# Altium schematic symbol library Switch.SchLib: 116 symbols (part 2 of 2)
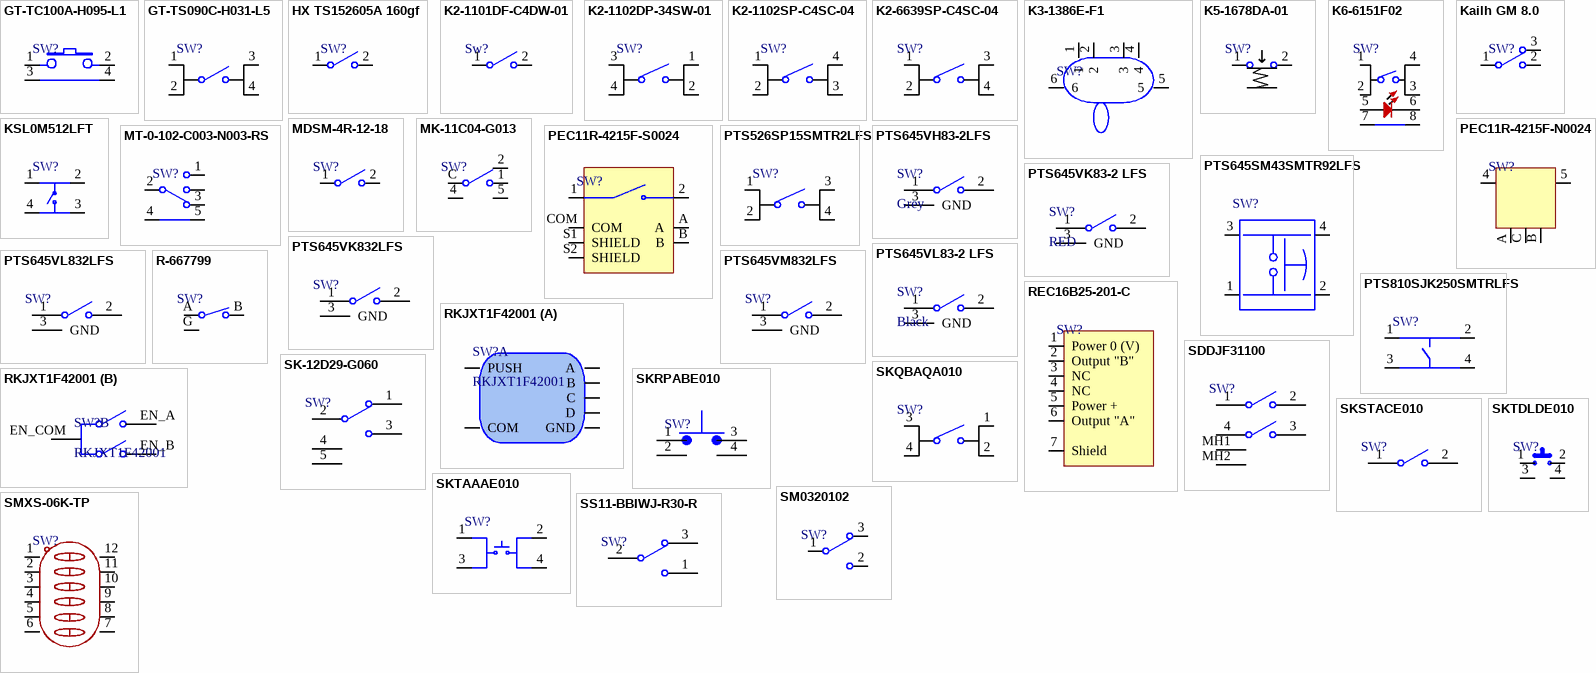
[diagram p3: symbols GT-TC100A-H095-L1 to SS11-BBIWJ-R30-R]

## MT-0-102-C003-N003-RS
designator SW?
125V Single Pole Double Throw (SPDT) Direct Insert 5A Plugin Toggle Switches ROHS; Manufacturer: YUEN FUNG; Manufacturer Part Number: MT-0-102-C003-N003-RS; Package: Plugin; LCSC Part Number: C1788495; Item Type: Toggle Switch; ComponentLink1Description: LCSC; ComponentLink1URL: https://www.lcsc.com/product-detail/Toggle-Switches_YUEN-FUNG-MT-0-102-C003-N003-RS_C1788495.html
footprint MT-0-102-C003-N003-RS*
pins: 1, 2, 3, 4, 5

## PEC11R-4215F-N0024
designator SW?
ROTARY ENCODER MECHANICAL 24PPR; Manufacturer: Bourns; Manufacturer Part Number: PEC11R-4215F-N0024; Item Type: Encoders; Supplier: Digikey; Supplier Part Number: PEC11R-4215F-N0024-ND; RoHS: Yes; Stock: 7495; Pricing: 1=1.92, 5=1.644, 10=1.54, 25=1.4116, 75=1.27227, 150=1.19127, 300=1.11517, 525=1.0571, 1050=0.9891 (USD); Housing Material: 4240ConductorMaterial; Length: 21.5mm; Width: 12.5mm; Height: 13.4mm; ComponentLink1URL: https://datasheet.ciiva.com/29349/pec11r-29349512.pdf?src-supplier=Digikey; ComponentLink1Description: https://datasheet.ciiva.com/29349/pec11r-29349512.pdf?src-supplier=Digikey; ComponentLink2URL: https://datasheet.ciiva.com/29927/pec11r-29927637.pdf?src-supplier=Avnet; ComponentLink2Description: https://datasheet.ciiva.com/29927/pec11r-29927637.pdf?src-supplier=Avnet
footprint PEC11R-4215F-N0024
pins: 4, 5, A, B, C

## PEC11R-4215F-S0024
designator SW?
ENCODER MECH QUAD VERT PC PIN; Manufacturer: Bourns; Manufacturer Part Number: PEC11R-4215F-S0024; Item Type: Encoders; Built in Switch: Yes; Current Rating: 10mA; Encoder Type: Incremental; Hole Diameter: 1.8mm; Number of Channels: 2; Number of Positions: 18; Output Type: Incremental, Quadrature; Pulses per Revolution: 24; Voltage Rating (DC): 5V; Supplier: Avnet; LCSC Part Number: C143790; RoHS: Compliant; Stock: 117; Pricing: 1=2.3, 10=2.07, 25=1.99, 50=1.91, 100=1.83 (USD); Detent: Yes; Height: 21.5mm; Housing Material: Metal; Length: 21.5mm; Lifecycle Status: Production; Max Operating Temperature: 70°C; Min Operating Temperature: -30°C; Mounting Technology: PCB, Panel, Through Hole; Orientation: Vertical; Packaging: Bulk; Radiation Hardening: No; REACH SVHC: Yes; Schedule B: 8543709655, 8543709655|8543709655, 8543709655|8543709655|8543709655, 8543709655|8543709655|8543709655|8543709655; Termination: PC Pins; Type: Mechanical; Width: 12.5mm; ComponentLink1URL: https://datasheet.octopart.com:443/PEC11R-4215F-S0024-Bourns-datasheet-152588733.pdf?src-supplier=IHS; ComponentLink1Description: https://datasheet.octopart.com:443/PEC11R-4215F-S0024-Bourns-datasheet-152588733.pdf?src-supplier=IHS; ComponentLink2URL: https://datasheet.octopart.com:443/PEC11R-4215F-S0024-Bourns-datasheet-68303416.pdf?src-supplier=Burklin+Elektronik; ComponentLink2Description: https://datasheet.octopart.com:443/PEC11R-4215F-S0024-Bourns-datasheet-68303416.pdf?src-supplier=Burklin+Elektronik; ComponentLink3URL: https://datasheet.octopart.com:443/PEC11R-4215F-S0024-Bourns-datasheet-41168452.pdf?src-supplier=element14+APAC; ComponentLink3Description: https://datasheet.octopart.com:443/PEC11R-4215F-S0024-Bourns-datasheet-41168452.pdf?src-supplier=element14+APAC; ComponentLink4URL: https://datasheet.octopart.com:443/PEC11R-4215F-S0024-Bourns-datasheet-16095859.pdf?src-supplier=RS+(Formerly+Allied+Electronics); ComponentLink4Description: https://datasheet.octopart.com:443/PEC11R-4215F-S0024-Bourns-datasheet-16095859.pdf?src-supplier=RS+(Formerly+Allied+Electronics); ComponentLink5URL: https://datasheet.octopart.com/PEC11R-4215F-S0024-Bourns-datasheet-16722594.pdf; ComponentLink5Description: https://datasheet.octopart.com/PEC11R-4215F-S0024-Bourns-datasheet-16722594.pdf; ComponentLink6URL: http://sigma.octopart.com:80/conflict_mineral_statement/Bourns-company-36.pdf?src-supplier=Compliance+Statements; ComponentLink6Description: http://sigma.octopart.com:80/conflict_mineral_statement/Bourns-company-36.pdf?src-supplier=Compliance+Statements
footprint PEC11R-4215F-S0024
pins: 1, 2, A, B, COM, S1 SHIELD, S2 SHIELD

## PTS526SP15SMTR2LFS
designator SW?
Tactile Switches 5.20 x 5.20 Tact Switch for SMT; Manufacturer: ITT C&K; Manufacturer Part Number: PTS526SP15SMTR2LFS; Supplier: Mouser; LCSC Part Number: C2991193; RoHS: No; Item Type: Switch; Stock: 8224; Pricing: 1=0.14, 10=0.135, 50=0.135, 100=0.12, 1000=0.12, 10000=0.102 (USD)
footprint PTS526SP15SMTR2 LFS
pins: 1, 2, 3, 4

## PTS645SM43SMTR92LFS
designator SW?
SWITCH TACTILE SPST-NO 0.05A 12V; Manufacturer: ITT C&K; Manufacturer Part Number: PTS645SM43SMTR92LFS; ComponentLink5URL: https://www.lcsc.com/product-detail/Tactile-Switches_C-K-PTS645SM43SMTR92LFS_C221880.html; ComponentLink5Description: LCSC; Package: SMD-4P,6x6mm; LCSC Part Number: C221880; Item Type: Switch
footprint PTS645SM43SMTR92LFS_ (SWITCH TACTILE SPST-NO 0.05A 12V)
pins: 1, 2, 3, 4

## PTS645VH83-2LFS
designator SW?, comment Grey
SWITCH TACTILE SPST-NO 0.05A 12V; Manufacturer: ITT C&K; Manufacturer Part Number: PTS645VH83-2LFS; Mechanical Life: 100000Cycles; Actuator Material: Nylon,Polyamide,PA66; Operating Force: 1.96N; Throw Configuration: SPST; Max Current Rating: 50mA; Illumination Type: Non-Illuminated; Switch Function: Off-Mom; Actuator Type: Standard; Supplier 1: RSComponents; RoHS: Yes; Category: Tactile Switches; Stock 1: 1; Pricing 1: 1=168.53700 (USD); Mount: Through Hole; Contact Plating: Silver; Contact Material: Bronze; Color: Black; Min Operating Temperature: -20°C; Max Operating Temperature: 60°C; Packaging: Bulk; Max Voltage Rating (DC): 12V; Termination: PC Pins; Voltage Rating (DC): 12V; Current Rating: 50mA; Package Quantity: 1000; Orientation: Right Angle; Series: PTS645; Length: 8.5mm; Depth: 12.3mm; Radiation Hardening: No; Lead Free: Lead Free; RoHS Compliant: Yes; ComponentLink1URL: https://datasheet.ciiva.com/26930/getdatasheetpartid-759839-26930136.pdf?src-supplier=Verical; ComponentLink1Description: https://datasheet.ciiva.com/26930/getdatasheetpartid-759839-26930136.pdf?src-supplier=Verical; ComponentLink2URL: https://datasheet.ciiva.com/14920/pts645-14920698.pdf?src-supplier=Digi-Key; ComponentLink2Description: https://datasheet.ciiva.com/14920/pts645-14920698.pdf?src-supplier=Digi-Key; Supplier Part Number 1: 1359158; LCSC Part Number: C221889
footprint PTS645VH83-2LFS_
pins: 1, 2, 3 GND

## PTS645VK83-2 LFS
designator SW?, comment RED
SWITCH TACTILE SPST-NO 0.05A 12V; Manufacturer: ITT C&K; Manufacturer Part Number: PTS645VK83-2LFS; Mechanical Life: 100000Cycles; Actuator Material: Nylon,Polyamide,PA66; Operating Force: 260gf; Current Rating: 50mA; Illumination Type: Non-Illuminated; Throw Configuration: SPST; Switch Function: Off-Mom; Actuator Type: Standard; Supplier 1: Mouser; RoHS: Yes; Category: Tactile Switches; Stock 1: 15223; Pricing 1: 1=0.29000, 10=0.27900, 50=0.27400, 100=0.25800, 1000=0.17200, 10000=0.16500 (USD); Mount: Through Hole; Color: Black; Contact Plating: Silver; Min Operating Temperature: -20°C; Max Operating Temperature: 60°C; Package Quantity: 1000; Packaging: Bulk; Voltage Rating (DC): 12V; Termination: PC Pin; Max Current Rating: 50mA; Orientation: Right Angle; Series: PTS645; Length: 8.5mm; Depth: 12.3mm; Lead Free: Lead Free; RoHS Compliant: Yes; ComponentLink1URL: http://components.arrow.com/part/dataview/58497163S587771N9444?src-supplier=Arrow+Electronics; ComponentLink1Description: http://components.arrow.com/part/dataview/58497163S587771N9444?src-supplier=Arrow+Electronics; Supplier Part Number 1: 611-PTS645VK832; LCSC Part Number: C2798927
footprint PTS645VK83-2 LFS_
pins: 1, 2, 3 GND

## PTS645VK832LFS
designator SW?
Switch Tactile N.O. SPST Round Button PC Pins 0.05A 12VDC 100000Cycles 2.55N Bracket Mount/Through Hole Bulk; Manufacturer: ITT C&K; Manufacturer Part Number: PTS645VK83-2LFS; Actuator Material: Nylon,Polyamide,PA66; Operating Force: 260gf; Current Rating: 50mA; Voltage Rating (DC): 12V; Illumination Type: Non-Illuminated; Switch Function: Off-Mom; Actuator Type: Standard; Supplier 1: Mouser; RoHS: Yes; Category: Tactile Switches; Stock 1: 15223; Pricing 1: 1=0.29000, 10=0.27900, 50=0.27400, 100=0.25800, 1000=0.17200, 10000=0.16500 (USD); Mount: Through Hole; Color: Black; Contact Plating: Silver; Mechanical Life: 100000Cycles; Min Operating Temperature: -20°C; Max Operating Temperature: 60°C; Package Quantity: 1000; Packaging: Bulk; Termination: PC Pin; Throw Configuration: SPST; Max Current Rating: 50mA; Orientation: Right Angle; Series: PTS645; Length: 8.5mm; Depth: 12.3mm; Lead Free: Lead Free; RoHS Compliant: Yes; ComponentLink1URL: http://components.arrow.com/part/dataview/58497163S587771N9444?src-supplier=Arrow+Electronics; ComponentLink1Description: http://components.arrow.com/part/dataview/58497163S587771N9444?src-supplier=Arrow+Electronics; Supplier Part Number 1: 611-PTS645VK832
footprint PTS645VK832LFS_
pins: 1, 2, 3 GND

## PTS645VL83-2 LFS
designator SW?, comment Black
SWITCH TACTILE SPST-NO 0.05A 12V; Manufacturer: ITT C&K; Manufacturer Part Number: PTS645VL83-2LFS; Mechanical Life: 100000Cycles; Actuator Material: Nylon,Polyamide,PA66; Throw Configuration: SPST; Operating Force: 1.27N; Max Current Rating: 50mA; Illumination Type: Non-Illuminated; Switch Function: Off-Mom; Actuator Type: Standard; Supplier 1: Future Electronics; RoHS: Yes; Category: Tactile Switches; Stock 1: 29000; Pricing 1: 1000=0.17400, 2000=0.17000, 4000=0.16700, 5000=0.16600, 15000=0.15900 (USD); Mount: Through Hole; Contact Plating: Silver; Contact Material: Bronze; Color: Black; Min Operating Temperature: -20°C; Max Operating Temperature: 60°C; Packaging: Bulk; Max Voltage Rating (DC): 12V; Termination: PC Pins; Current Rating: 50mA; Voltage Rating (DC): 12V; Package Quantity: 1000; Orientation: Right Angle; Series: PTS645; Length: 7.5mm; Depth: 12.3mm; Radiation Hardening: No; Lead Free: Lead Free; RoHS Compliant: Yes; ComponentLink1URL: https://datasheet.ciiva.com/14920/pts645-14920695.pdf?src-supplier=Digi-Key; ComponentLink1Description: https://datasheet.ciiva.com/14920/pts645-14920695.pdf?src-supplier=Digi-Key; ComponentLink2URL: https://datasheet.ciiva.com/48483/pts645-48483566.pdf?src-supplier=Avnet; ComponentLink2Description: https://datasheet.ciiva.com/48483/pts645-48483566.pdf?src-supplier=Avnet; Supplier Part Number 1: 5057816; LCSC Part Number: C2798965
footprint PTS645VL83-2/LFS_
pins: 1, 2, 3 GND

## PTS645VL832LFS
designator SW?
SWITCH TACTILE SPST-NO 0.05A 12V; Manufacturer: ITT C&K; Manufacturer Part Number: PTS645VL83-2LFS; Mechanical Life: 100000Cycles; Actuator Material: Nylon,Polyamide,PA66; Throw Configuration: SPST; Operating Force: 1.27N; Max Current Rating: 50mA; Illumination Type: Non-Illuminated; Switch Function: Off-Mom; Actuator Type: Standard; Supplier 1: Future Electronics; RoHS: Yes; Category: Tactile Switches; Stock 1: 29000; Pricing 1: 1000=0.17400, 2000=0.17000, 4000=0.16700, 5000=0.16600, 15000=0.15900 (USD); Mount: Through Hole; Contact Plating: Silver; Contact Material: Bronze; Color: Black; Min Operating Temperature: -20°C; Max Operating Temperature: 60°C; Packaging: Bulk; Max Voltage Rating (DC): 12V; Termination: PC Pins; Current Rating: 50mA; Voltage Rating (DC): 12V; Package Quantity: 1000; Orientation: Right Angle; Series: PTS645; Length: 7.5mm; Depth: 12.3mm; Radiation Hardening: No; Lead Free: Lead Free; RoHS Compliant: Yes; ComponentLink1URL: https://datasheet.ciiva.com/14920/pts645-14920695.pdf?src-supplier=Digi-Key; ComponentLink1Description: https://datasheet.ciiva.com/14920/pts645-14920695.pdf?src-supplier=Digi-Key; ComponentLink2URL: https://datasheet.ciiva.com/48483/pts645-48483566.pdf?src-supplier=Avnet; ComponentLink2Description: https://datasheet.ciiva.com/48483/pts645-48483566.pdf?src-supplier=Avnet; Supplier Part Number 1: 5057816; LCSC Part Number: C285525
footprint PTS645VL832LFS_
pins: 1, 2, 3 GND

## PTS645VM832LFS
designator SW?
Blue SWITCH TACTILE SPST-NO 0.05A 12V; Manufacturer: ITT C&K; Manufacturer Part Number: PTS645VM83-2LFS; Mechanical Life: 100000Cycles; Actuator Material: Nylon,Polyamide,PA66; Operating Force: 1.57N; Current Rating: 50mA; Throw Configuration: SPST; Illumination Type: Non-Illuminated; Switch Function: Off-Mom; Actuator Type: Standard; Supplier 1: Mouser; RoHS: Yes; Category: Tactile Switches; Stock 1: 10398; Pricing 1: 1=0.32000, 10=0.30600, 50=0.28900, 100=0.25700, 1000=0.18100, 10000=0.17400 (USD); Mount: Through Hole; Color: Black; Contact Plating: Silver; Min Operating Temperature: -20°C; Max Operating Temperature: 60°C; Package Quantity: 1000; Packaging: Bulk; Voltage Rating (DC): 12V; Max Current Rating: 50mA; Termination: PC Pins; Orientation: Right Angle; Series: PTS645; Length: 7.5mm; Depth: 12.3mm; RoHS Compliant: Yes; ComponentLink1URL: https://datasheet.ciiva.com/26859/getdatasheetpartid-742303-26859307.pdf?src-supplier=Verical; ComponentLink1Description: https://datasheet.ciiva.com/26859/getdatasheetpartid-742303-26859307.pdf?src-supplier=Verical; Supplier Part Number 1: 611-PTS645VM832; LCSC Part Number: C285530
footprint PTS645VM832LFS_
pins: 1, 2, 3 GND

## PTS810SJK250SMTRLFS
designator SW?
SWITCH TACTILE SPST-NO 0.05A 16V; Manufacturer: ITT C&K; Manufacturer Part Number: PTS810SJK250SMTRLFS; Item Type: Tactile Switches; Number of Positions: 2NUMBER; Supplier: Rs; LCSC Part Number: C221896; RoHS: Yes; Stock: 100; Lead Free: 5697LeadFree; ComponentLink1URL: https://datasheet.ciiva.com/18514/pts810-4mar13-18514061.pdf?src-supplier=Digikey; ComponentLink1Description: https://datasheet.ciiva.com/18514/pts810-4mar13-18514061.pdf?src-supplier=Digikey; ComponentLink2URL: https://datasheet.ciiva.com/18514/pts810-4mar13-18514062.pdf?src-supplier=Digikey; ComponentLink2Description: https://datasheet.ciiva.com/18514/pts810-4mar13-18514062.pdf?src-supplier=Digikey; ComponentLink3URL: https://datasheet.ciiva.com/18514/pts810-4mar13-18514063.pdf?src-supplier=Digikey; ComponentLink3Description: https://datasheet.ciiva.com/18514/pts810-4mar13-18514063.pdf?src-supplier=Digikey
footprint PTS810SJK250SMTR LFS
pins: 1, 2, 3, 4

## R-667799
designator SW?
SWITCH TACTILE, SPST-NO, 0.05A 1; Manufacturer: Mitsumi; Manufacturer Part Number: R-667799; Item Type: Tactile Switch; Supplier: Digi-Key; Supplier Part Number: 2508-R-667799CT-ND; RoHS: No; Category: Tactile Switches; Stock: 11526; Pricing: 1=0.32, 10=0.31, 25=0.2944, 100=0.2666, 250=0.24304, 500=0.2259, 1000=0.19271, 2500=0.18736 (USD)
footprint R-667799
pins: A, B, G

## REC16B25-201-C
designator SW?
ROTARY ENCODER OPTICAL 25PPR; Manufacturer: Nidec Copal; Manufacturer Part Number: REC16B25-201-C; Operating Supply Voltage: 5V; Pulses per Revolution: 25; Output Type: Quadrature,Incremental; Detent: No; Hole Diameter: 9mm; Supplier: Digikey; LCSC Part Number: C2921942; RoHS: Yes; Category: Encoders; Pricing: 20=19.018 (USD); Mounting Technology: Through Hole,Panel,PCB; Series: REC16; Encoder Type: Optical; Built in Switch: No; Orientation: Vertical; Termination: PC Pin; RoHS Compliant: Yes; ComponentLink1URL: https://datasheet.ciiva.com/11832/0900766b80933a69-11832618.pdf?src-supplier=Rs; ComponentLink1Description: https://datasheet.ciiva.com/11832/0900766b80933a69-11832618.pdf?src-supplier=Rs; ComponentLink2URL: https://datasheet.ciiva.com/18424/70041175-18424549.pdf?src-supplier=Allied+Electronics; ComponentLink2Description: https://datasheet.ciiva.com/18424/70041175-18424549.pdf?src-supplier=Allied+Electronics; Item Type: Rotary Encoder
footprint REC16B25-201-C
pins: 1 Power 0 (V), 2 Output "B", 3 NC, 4 NC, 5 Power +, 6 Output "A", 7 Shield

## RKJXT1F42001
designator SW?
Electromechanical Switch 4-Directional Stick Switch 0.01A Bulk; Manufacturer: Alps Alpine; Manufacturer Part Number: RKJXT1F42001; Item Type: Switch; Supplier: Mouser; Supplier Part Number: 688-RKJXT1F42001; RoHS: Yes; Category: Pushbutton Switches; Stock: 1987; Pricing: 1=8.44, 10=7.1, 25=6.33, 50=6.33, 100=5.99, 250=5.75, 1000=5.75, 10000=5.75 (USD); ComponentLink1URL: https://datasheet.ciiva.com/16197/rkjxt-16197381.pdf?src-supplier=Onlinecomponents.com; ComponentLink1Description: https://datasheet.ciiva.com/16197/rkjxt-16197381.pdf?src-supplier=Onlinecomponents.com
footprint RKJXT1F42001
part A pins: A, B, C, COM, D, GND, PUSH
part B pins: EN_A, EN_B, EN_COM

## SDDJF31100
designator SW?
Black Concave edge bending Double pole single throw O - Solder Lug(Straight foot) 16A 250V Plugin Rocker Switches ROHS; Manufacturer: ALPSALPINE; Manufacturer Part Number: SDDJF31100; Item Type: Switch; Package: Plugin; LCSC Part Number: C380204; ComponentLink1Description: LCSC; ComponentLink1URL: https://www.lcsc.com/product-detail/Rocker-Switches_ALPSALPINE-SDDJF31100_C380204.html
footprint SDDJF31100
pins: 1, 2, 3, 4, MH1, MH2

## SK-12D29-G060
designator SW?
Lying 1A SPDT 9.6mm 8.6mm 24V 3.6mm Black PCPin 10000 Rectangular columnar -25℃~+70℃ Plugin Slide Switches ROHS; Manufacturer: G-Switch; Manufacturer Part Number: SK-12D29-G060; Package: Custom; LCSC Part Number: C2848877; Item Type: Slide Switch; ComponentLink1Description: LCSC; ComponentLink1URL: https://www.lcsc.com/product-detail/Slide-Switches_G-Switch-SK-12D29-G060_C2848877.html
footprint SK-12D29-G060
pins: 1, 2, 3, 4, 5

## SKQBAQA010
designator SW?
10mm 23.2mm Round Button 50mA Straight 10mm SPST 12V Plugin Tactile Switches ROHS; Manufacturer: Alps Electric; Manufacturer Part Number: SKQBAQA010; Item Type: Switch; Operating Force: 1.57N; Supplier: Mouser; LCSC Part Number: C382054; RoHS: Yes; Stock: 1720; Pricing: 1=1.19, 10=1.14, 50=1.14, 100=0.93, 1000=0.733, 10000=0.553 (USD); Mounting Technology: Through Hole; Color: Grey; Contact Plating: Silver; Min Operating Temperature: -30°C; Max Operating Temperature: 85°C; Current Rating: 50mA; Packaging: Bulk; Voltage Rating (DC): 12V; Max Current Rating: 50mA; Throw Configuration: SPST; Max Voltage Rating (DC): 12V; Termination: PC Pins; Orientation: Straight; Series: SKQB; Length: 10mm; Depth: 10.3mm; Radiation Hardening: No; Lead Free: Lead Free; RoHS Compliant: Yes; ComponentLink1URL: https://datasheet.ciiva.com/26906/getdatasheetpartid-652286-26906303.pdf?src-supplier=Verical; ComponentLink1Description: https://datasheet.ciiva.com/26906/getdatasheetpartid-652286-26906303.pdf?src-supplier=Verical
footprint SKQBAQA010
pins: 1, 2, 3, 4

## SKRPABE010
designator SW?
SWITCH TACTILE SPST-NO 0.05A 16V /; Manufacturer: ALPS; Manufacturer Part Number: SKRPABE010; Description: Switch Tactile N.O. SPST Button J-Bend 0.05A 16VDC 1.57N SMD Automotive T/R; Item Type: Tactile Switches; Actuator Length: 711.2µm; Contact Current Rating: 50mA; Contact Resistance: 500mΩ; Electrical Life: 100kcycles; Insulation Resistance: 100MΩ; Number of Positions: 1; Operating Force: 1.57N; Throw Configuration: SPST; Supplier: DigiKey; Supplier Part Number: 4809-SKRPABE010CT-ND; RoHS: Compliant; Stock: 35807; Pricing: 1=0.21, 10=0.179, 25=0.1684, 100=0.1511, 250=0.14016, 500=0.13228, 1000=0.12484 (USD); Case/Package: SMD/SMT; Color: Clear; Contact Plating: Silver; Current Rating: 50mA; Depth: 4.6mm; Height: 1.8034mm; Lead Free: Lead Free; Length: 4.191mm; Life (Cycles): 100kcycles; Lifecycle Status: Production; Max Current Rating: 50mA; Max Operating Temperature: 85°C; Max Voltage Rating (DC): 16V; Min Operating Temperature: -30°C; Mounting Technology: Surface Mount; Orientation: Straight; Radiation Hardening: No; Termination: J-Bend; Voltage Rating (DC): 16V; ComponentLink1URL: https://datasheet.octopart.com:443/SKRPABE010-ALPS-datasheet-182234810.pdf?src-supplier=IHS; ComponentLink1Description: https://datasheet.octopart.com:443/SKRPABE010-ALPS-datasheet-182234810.pdf?src-supplier=IHS; ComponentLink2URL: https://datasheet.octopart.com:443/SKRPABE010-ALPS-datasheet-182235266.pdf?src-supplier=IHS; ComponentLink2Description: https://datasheet.octopart.com:443/SKRPABE010-ALPS-datasheet-182235266.pdf?src-supplier=IHS; ComponentLink3URL: https://datasheet.octopart.com:443/SKRPABE010-ALPS-datasheet-41327040.pdf?src-supplier=Master+Electronics; ComponentLink3Description: https://datasheet.octopart.com:443/SKRPABE010-ALPS-datasheet-41327040.pdf?src-supplier=Master+Electronics; ComponentLink4URL: https://datasheet.octopart.com:443/SKRPABE010-ALPS-datasheet-138899521.pdf?src-supplier=TME; ComponentLink4Description: https://datasheet.octopart.com:443/SKRPABE010-ALPS-datasheet-138899521.pdf?src-supplier=TME; ComponentLink5URL: https://datasheet.octopart.com:443/SKRPABE010-ALPS-datasheet-37145204.pdf?src-supplier=Electro+Sonic; ComponentLink5Description: https://datasheet.octopart.com:443/SKRPABE010-ALPS-datasheet-37145204.pdf?src-supplier=Electro+Sonic
footprint SKRPABE010
pins: 1, 2 1, 3 2, 4 2

## SKSTACE010
designator SW?
Tactile Switches SMT Top Push 0.9mm 7N Trav 100m Yellow; Manufacturer: Alps Electric; Manufacturer Part Number: SKSTACE010; Supplier 1: Mouser; RoHS: Yes; Category: Tactile Switches; Stock 1: 1089; Pricing 1: 1=1.08000, 10=1.08000, 50=0.90100, 100=0.81900, 1000=0.76700, 10000=0.74100 (USD); RoHS Compliant: Yes; Supplier Part Number 1: 688-SKSTACE010; LCSC Part Number: C341731
footprint SKSTACE010_
pins: 1, 2

## SKTAAAE010
designator SW?
SWITCH TACTILE SPST-NO 0.05A 12V; Manufacturer: Alps Electric; Manufacturer Part Number: SKTAAAE010; Item Type: Tactile Switches; Supplier: Digikey; LCSC Part Number: C358616; RoHS: Yes; Stock: 54831; Pricing: 1=0.4, 10=0.348, 25=0.3256, 100=0.2911, 250=0.26972, 500=0.25456, 1000=0.24043, 2500=0.22353, 5000=0.21213 (USD); RoHS Compliant: Yes
footprint SKTAAAE010
pins: 1, 2, 3, 4

## SKTDLDE010
designator SW?
50mA Lying SPST 12V Plugin Tactile Switches ROHS; Manufacturer: ALPSALPINE; Manufacturer Part Number: SKTDLDE010; Package: Plugin; LCSC Part Number: C115365; Item Type: Tactile Switch; ComponentLink1Description: LCSC; ComponentLink1URL: https://www.lcsc.com/product-detail/Tactile-Switches_ALPSALPINE-SKTDLDE010_C115365.html
footprint SKTDLDE010
pins: 1, 2, 3, 4

## SM0320102
designator SW?
SWITCH SLIDE SPDT 500MA 12V; Manufacturer: NKK Switches; Manufacturer Part Number: SM0320102; Item Type: Slide Switches; Supplier: Digikey; Supplier Part Number: 360-2920-ND; RoHS: Yes; Stock: 1371; Pricing: 1=4.7, 10=4.507, 25=4.1148, 100=3.5661, 250=3.233, 500=2.99788, 1000=2.78235, 2500=2.52762 (USD); ComponentLink1URL: https://datasheet.ciiva.com/5279/smslides-23398-5279864.pdf?src-supplier=Mouser; ComponentLink1Description: https://datasheet.ciiva.com/5279/smslides-23398-5279864.pdf?src-supplier=Mouser; ComponentLink2URL: https://datasheet.ciiva.com/28378/1783589-28378567.pdf?src-supplier=Element14; ComponentLink2Description: https://datasheet.ciiva.com/28378/1783589-28378567.pdf?src-supplier=Element14; ComponentLink3URL: https://datasheet.ciiva.com/16359/msnonilluminated-16359931.pdf?src-supplier=Future+Electronics; ComponentLink3Description: https://datasheet.ciiva.com/16359/msnonilluminated-16359931.pdf?src-supplier=Future+Electronics
footprint SM0320102
pins: 1, 2, 3

## SMXS-06K-TP
designator SW?
6 digits 24V Black 25mA 3000 Times SMD DIP Switches ROHS; Manufacturer: SM Switch; Manufacturer Part Number: SMXS-06K-TP; Package: SMD; LCSC Part Number: C5439765; Item Type: DIP SWITCH; ComponentLink1Description: LCSC; ComponentLink1URL: https://www.lcsc.com/product-detail/DIP-Switches_SM-Switch-SMXS-06K-TP_C5439765.html
footprint SMXS-06K-TP
pins: 1, 2, 3, 4, 5, 6, 7, 8, 9, 10, 11, 12

## SS11-BBIWJ-R30-R
designator SW?
Black Concave edge bending SPDT | O PCPin 16A 250V Plugin Rocker Switches ROHS; Manufacturer: Legion; Manufacturer Part Number: SS11-BBIWJ-R30-R; Item Type: Switch; Package: Plugin; LCSC Part Number: C309071; ComponentLink1Description: LCSC; ComponentLink1URL: https://www.lcsc.com/product-detail/Rocker-Switches_Legion-SS11-BBIWJ-R30-R_C309071.html
footprint SS11-BBIWJ-R30-R
pins: 1, 2, 3

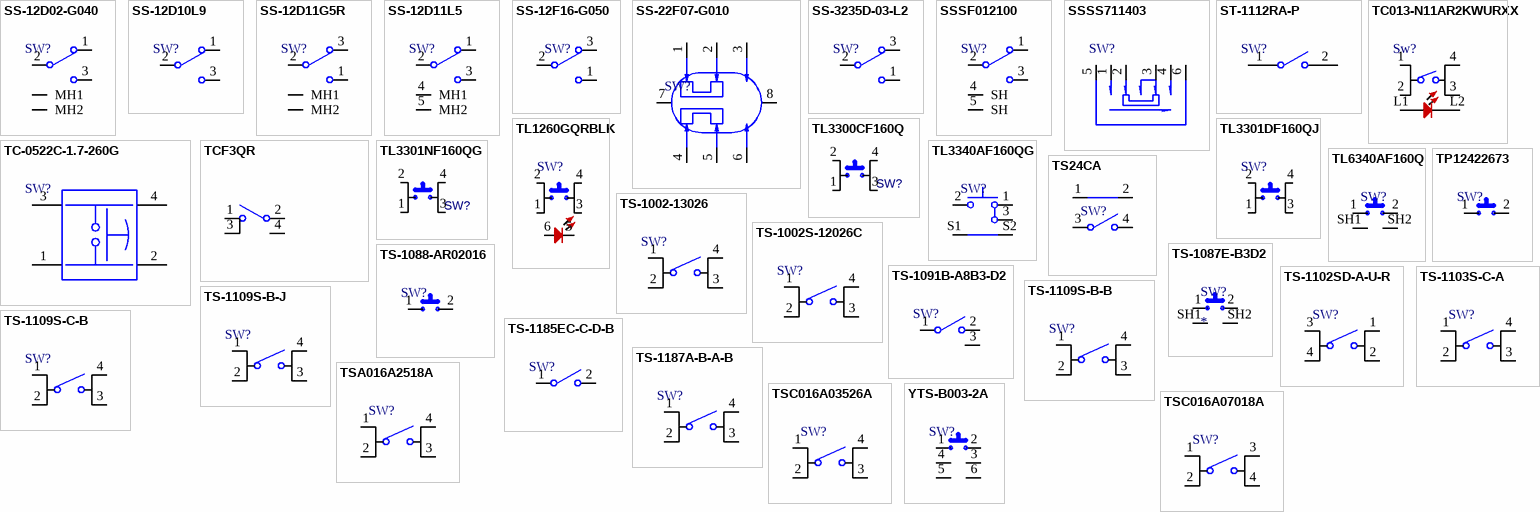
[diagram p2: symbols SS-12D02-G040 to YTS-B003-2A]

## SS-12D02-G040
designator SW?
Straight 1A SPDT 8.7mm 8.6mm 24V 4.5mm Black PCPin 10000 Rectangular columnar -25℃~+70℃ Plugin Slide Switches ROHS; Manufacturer: G-Switch; Manufacturer Part Number: SS-12D02-G040; Item Type: Switch; Package: Custom; LCSC Part Number: C2876023; ComponentLink1Description: LCSC; ComponentLink1URL: https://www.lcsc.com/product-detail/Slide-Switches_G-Switch-SS-12D02-G040_C2876023.html
footprint SS-12D02-G040
pins: 1, 2, 3, MH1, MH2

## SS-12D10L9
designator SW?
3A Direct Insert Single Pole Double Throw (SPDT) 125V Black 10,000 times Plugin Slide Switches ROHS; Manufacturer: XKB Connectivity; Item Type: Switch; Package: Plugin; LCSC Part Number: C319011; ComponentLink1Description: LCSC; ComponentLink1URL: https://www.lcsc.com/product-detail/Slide-Switches_XKB-Connection-SS-12D10L9_C319011.html
footprint SS-12D10L9
pins: 1, 2, 3

## SS-12D11G5R
designator SW?
Shrouded 5A SPDT 125V 6.3mm 13.5mm 125V 6.6mm 5A PCPin 10000 Rectangular columnar -40℃~+85℃ Black Plugin Slide Switches ROHS; Manufacturer Part Number: SS-12D11G5R; Manufacturer: XKB Connectivity; Package: Custom; LCSC Part Number: C388633; ComponentLink1Description: LCSC; ComponentLink1URL: https://www.lcsc.com/product-detail/Slide-Switches_XKB-Connectivity-SS-12D11G5R_C388633.html; Item Type: Slide Switch
footprint SS-12D11G5R_
pins: 1, 2, 3, MH1, MH2

## SS-12D11L5
designator SW?
Lying 3A SPDT 125V 6.3mm 13.5mm 125V 6.6mm 3A PCPin 10000 Rectangular columnar -40℃~+85℃ Black Plugin Slide Switches ROHS; Manufacturer: XKB Connectivity; Manufacturer Part Number: SS-12D11L5; Item Type: Switch; Package: Plugin; LCSC Part Number: C319010; ComponentLink1Description: LCSC Part Number; ComponentLink1URL: https://www.lcsc.com/product-detail/Slide-Switches_XKB-Connectivity-SS-12D11L5_C319010.html
footprint SS-12D11L5
pins: 1, 2, 3, 4 MH1, 5 MH2

## SS-12F16-G050
designator SW?
Straight 1A SPDT 24V Black 1万次 Plugin Slide Switches ROHS; Manufacturer: G-Switch; Manufacturer Part Number: SS-12F16-G050; Package: Plugin; LCSC Part Number: C2876006; Item Type: Slide Switch; ComponentLink1Description: LCSC; ComponentLink1URL: https://www.lcsc.com/product-detail/Slide-Switches_G-Switch-SS-12F16-G050_C2876006.html
footprint SS-12F16-G050
pins: 1, 2, 3

## SS-22F07-G010
designator SW?
Direct Insert 1A DPDT 24V Black 10,000 times Plugin Slide Switches ROHS; Manufacturer: G-Switch; Manufacturer Part Number: SS-22F07-G010; Item Type: Switch; Package: Plugin; LCSC Part Number: C2848924; ComponentLink1Description: LCSC; ComponentLink1URL: https://www.lcsc.com/product-detail/Slide-Switches_G-Switch-SS-22F07-G010_C2848924.html
footprint SS-22F07-G010
pins: 1, 2, 3, 4, 5, 6, 7, 8

## SS-3235D-03-L2
designator SW?
SPDT 50mA @ 12VDC 12V On-On SMD Toggle Switches RoHS; Manufacturer: XKB Connectivity; Manufacturer Part Number: SS-3235D-03-L2; Actuator Orientation: Vertical; Switch Height: 3mm; Actuator Type: Standard; Electrical Life Cycles: 10000; Operating Force: 200±100gf; Package: SMD; Circuit: SPDT; Contact Rating @ Voltage: 50mA @ 12VDC; Rated Voltage(DC): 12V; Mounting Type: Surface Mount; Contact Material: Brass; Contact Finish: Silver; LCSC Part Number: C381097; ComponentLink1Description: LCSC; ComponentLink1URL: https://www.lcsc.com/product-detail/Slide-Switches_XKB-Connectivity-SS-3235D-03-L2_C381097.html
footprint SS-3235D-03-L2_
pins: 1, 2, 3

## SSSF012100
designator SW?
Straight 100mA SPDT 30V Plugin Slide Switches ROHS; Manufacturer: Alps Electric; Manufacturer Part Number: SSSF012100; Mechanical Life: 10000Cycles; Throw Configuration: SPDT,SP; Illumination Type: Non-Illuminated; Supplier: Digikey; LCSC Part Number: C341735; RoHS: Yes; Item Type: Slide Switche; Stock: 748; Pricing: 1=1.44, 10=1.381, 25=1.2984, 100=1.1215, 250=1.02208, 800=0.95025, 1600=0.88395, 3200=0.80108, 5600=0.74583 (USD); Mounting Technology: Through Hole; Min Operating Temperature: -10°C; Max Operating Temperature: 60°C; Packaging: Bulk; Max Voltage Rating (DC): 30V; Max Current Rating: 100mA; Contact Current Rating: 100mA; Current Rating: 100mA; Package Quantity: 800; Voltage Rating (AC): 30V; Termination: PC Pins; Length: 14.5mm; Depth: 7mm; Radiation Hardening: No; RoHS Compliant: Yes; ComponentLink1URL: https://datasheet.ciiva.com/18147/getdatasheetpartid-652182-18147430.pdf?src-supplier=Verical; ComponentLink1Description: https://datasheet.ciiva.com/18147/getdatasheetpartid-652182-18147430.pdf?src-supplier=Verical
footprint SSSF012100
pins: 1, 2, 3, 4 SH, 5 SH

## SSSS711403
designator SW?
300mA Horizontal attachment triple-pole/single-throw 4V 10,000 times SMD Slide Switches ROHS / Switch Slide SP3T Side Slide 0.3A 4VDC 10000Cycle Gull Wing SMD T/R; Manufacturer: Alps Electric; Manufacturer Part Number: SSSS711403; Mechanical Life: 10000Cycles; Contact Resistance: 70mR; Supplier: Avnet; LCSC Part Number: C160877; RoHS: Yes; Item Type: Slide Switches; Stock: 16000; Pricing: 2000=0.72384, 4000=0.7072, 8000=0.69056, 12000=0.67392, 16000=0.65728, 20000=0.64064, 200000=0.63232 (USD); Mounting Technology: Surface Mount; Case/Package: SMD/SMT; Min Operating Temperature: -10°C; Max Operating Temperature: 85°C; Voltage Rating (AC): 4V; Packaging: Tape and Reel; Max Voltage Rating (DC): 4V; Contact Current Rating: 300mA; Throw Configuration: SP3T; Termination: Solder; Electrical Life: 10000Cycles; Orientation: Right Angle; Radiation Hardening: No; RoHS Compliant: Yes; ComponentLink1URL: https://datasheet.ciiva.com/16174/793ssss7-16174698.pdf?src-supplier=Onlinecomponents.com; ComponentLink1Description: https://datasheet.ciiva.com/16174/793ssss7-16174698.pdf?src-supplier=Onlinecomponents.com
footprint SSSS711403
pins: 1, 2, 3, 4, 5, 6

## ST-1112RA-P
designator SW?
-20℃~+85℃ SMDSplicing Black Rectangle button 50mA Surface Mount SPST 100MΩ 100000 250gf@±50gf 12V SMD Tactile Switches ROHS; Manufacturer: RI SHENG; Manufacturer Part Number: ST-1112RA-P; Item Type: Switch; Footprint: Custom; ComponentLink1Description: LCSC; ComponentLink1URL: https://www.lcsc.com/product-detail/Tactile-Switches_RI-SHENG-ST-1112RA-P_C589180.html; LCSC Part Number: C589180
footprint ST-1112RA-P_
pins: 1, 2

## TC013-N11AR2KWURXX
designator Sw?
Tactile Switches TACTILE/JOG SWITCH SPST50mA 12VDC180gf; Manufacturer: Well Buying; Manufacturer Part Number: TC013-N11AR2KWURXX; Supplier: Mouser; Supplier Part Number: 107-TC013-N11AR2KWUR; Stock: 200; Pricing: 1=2.91, 10=2.91, 50=2.42, 100=2.22, 1000=1.87, 10000=1.58 (USD); Item Type: Tactile Switch; ComponentLink1Description: Mouser; ComponentLink1URL: https://www.mouser.co.uk/ProductDetail/Well-Buying/TC013-N11AR2KWURXX?qs=vLWxofP3U2zrMQ1CZcNZrQ%3D%3D&_gl=1*g8ep1t*_ga*MTY0Nzg2ODA4Ni4xNjg5MjQ2Nzk3*_ga_15W4STQT4T*MTY4OTI0Njc5Ny4xLjEuMTY4OTI0NjgyMy4wLjAuMA..*_ga_1KQLCYKRX3*MTY4OTI0Njc5Ny4xLjEuMTY4OTI0NjgyMy4zNC4wLjA
footprint TC013-N11AR2KWURXX
pins: 1, 2, 3, 4, L1, L2

## TC-0522C-1.7-260G
designator SW?
No Gull Wing 50mA 100MΩ 80000 260gf@±50gf 12V -25℃~+85℃ 1.7mm Golden Round Button Brick nogging SPST SMD Tactile Switches ROHS; Manufacturer: HCTL; Manufacturer Part Number: TC-0522C-1.7-260G; Item Type: Switch; Value: -; Footprint: Custom; ComponentLink1Description: LCSC; ComponentLink1URL: https://www.lcsc.com/product-detail/Tactile-Switches_HCTL-TC-0522C-1-7-260G_C2845290.html; LCSC Part Number: C2845290
footprint TC-0522C-1.7-260G_
pins: 1, 2, 3, 4

## TCF3QR
designator SW?
20mA Surface Mount SPST 15V SMD,2.9x4.5mm Tactile Switches ROHS; Manufacturer: Diptronics; Manufacturer Part Number: TCF3QR; Package: SMD,2.9x4.5mm; LCSC Part Number: C495937; Item Type: Tactile Switch; ComponentLink1Description: LCSC; ComponentLink1URL: https://www.lcsc.com/product-detail/Tactile-Switches_Diptronics-TCF3QR_C495937.html; Supplier: Mouser; Supplier Part Number: 113-TCF3QR; RoHS: No; Category: Uncategorized; Stock: 4095; Pricing: 1=0.81, 10=0.81, 50=0.68, 100=0.617, 1000=0.517, 10000=0.392 (USD)
footprint TCF3QR
pins: 1, 2, 3, 4

## TL1260GQRBLK
designator SW?
SWITCH TACTILE SPST-NO 0.05A 12V; Manufacturer: E-Switch; Manufacturer Part Number: TL1260GQRBLK; Mechanical Life: 50000Cycles; Actuator Material: PBT,Polybutylene; Illumination Type: LED,Illuminated; Operating Force: 160gf; Throw Configuration: SPST; Switch Travel: 0.2mm; Switch Function: Off-Mom; Current Rating: 50mA; Illumination Color: Green; Item Type: Tactile Switch; Supplier 1: Digi-Key; RoHS: Yes; Category: Tactile Switches; Stock 1: 1154; Pricing 1: 1=3.53, 10=3.387, 25=3.0924, 100=2.6801, 250=2.42976, 500=2.25304, 1000=2.09106, 2500=1.89963, 5000=1.8225 (USD); Mounting Technology: Through Hole; Min Operating Temperature: -20°C; Max Operating Temperature: 70°C; Packaging: Bulk; Package Quantity: 1; Termination: PC Pin; Series: TL1260; Voltage Rating (DC): 12V; RoHS Compliant: Yes; Lead Free: Lead Free; ComponentLink1URL: https://datasheet.ciiva.com/2902/b200003h-2902974.pdf?src-supplier=Digi-Key; ComponentLink1Description: https://datasheet.ciiva.com/2902/b200003h-2902974.pdf?src-supplier=Digi-Key; Supplier Part Number 1: EG6023-ND
footprint TL1260GQRBLK
pins: 1, 2, 3, 4, 5 -, 6 +

## TL3300CF160Q
designator SW?
SWITCH TACTILE SPST-NO 0.05A 12V; Manufacturer: E-Switch; Manufacturer Part Number: TL3300CF160Q; Mechanical Life: 200000Cycles; Operating Force: 160gf; Current Rating: 50mA; Throw Configuration: SPST; Contact Resistance: 100mR; Illumination Type: Non-Illuminated; Switch Travel: 0.35mm; Switch Function: Off-Mom; Actuator Type: Standard; Actuator Length: 5mm; Item Type: Tactile Switch; Supplier 1: Mouser; Stock 1: 1884; Pricing 1: 1=0.53, 10=0.513, 50=0.43, 100=0.393, 1000=0.293, 10000=0.274 (USD); Mount: Surface Mount; Case/Package: SMD/SMT; Contact Plating: Silver; Min Operating Temperature: -25°C; Max Operating Temperature: 70°C; Package Quantity: 1; Packaging: Tape and Reel; Voltage Rating (DC): 12V; Max Voltage Rating (DC): 12V; Termination: Gull Wing; Electrical Life: 200000Cycles; Orientation: Straight; Series: TL3300; Lead Free: Lead Free; RoHS Compliant: Yes; ComponentLink1URL: http://www.e-switch.com/system/asset/product_line/data_sheet/157/TL3300.pdf?src-supplier=Digi-Key; ComponentLink1Description: http://www.e-switch.com/system/asset/product_line/data_sheet/157/TL3300.pdf?src-supplier=Digi-Key; ComponentLink2URL: http://spec_sheets.e-switch.com/specs/N301102.pdf?src-supplier=Digi-Key; ComponentLink2Description: http://spec_sheets.e-switch.com/specs/N301102.pdf?src-supplier=Digi-Key; Supplier Part Number 1: 612-TL3300CF160Q; LCSC Part Number: C273516
footprint TL3300CF160Q. (SWITCH TACTILE SPST-NO 0.05A 12V)
pins: 1, 2, 3, 4

## TL3301DF160QJ
designator SW?
SWITCH TACTILE SPST-NO 0.05A 12V; Manufacturer: E-Switch; Manufacturer Part Number: TL3301DF160QJ; Item Type: Tactile Switch; Supplier: Digi-Key; Supplier Part Number: EG5464CT-ND; RoHS: Yes; Category: Tactile Switches; Stock: 3310; Pricing: 1=0.53, 10=0.515, 25=0.4964, 100=0.4295 (USD); ComponentLink1URL: https://datasheet.ciiva.com/16156/j100617-16156328.pdf?src-supplier=Onlinecomponents.com; ComponentLink1Description: https://datasheet.ciiva.com/16156/j100617-16156328.pdf?src-supplier=Onlinecomponents.com; ComponentLink2URL: https://datasheet.ciiva.com/16370/j100617-16370167.pdf?src-supplier=Future+Electronics; ComponentLink2Description: https://datasheet.ciiva.com/16370/j100617-16370167.pdf?src-supplier=Future+Electronics; ComponentLink3URL: https://datasheet.ciiva.com/2902/tl3301-2902785.pdf?src-supplier=Digi-Key; ComponentLink3Description: https://datasheet.ciiva.com/2902/tl3301-2902785.pdf?src-supplier=Digi-Key; LCSC Part Number: C273524
footprint TL3301DF160QJ
pins: 1, 2, 3, 4

## TL3301NF160QG
designator SW?, comment Tactile Switch  (value not drawn)
SWITCH TACTILE SPST-NO 0.05A 12V; Manufacturer: E-Switch; Manufacturer Part Number: TL3301NF160QG/TR; Value: Custom; Package: SMD (6.00mm x 6.00mm); LCSC Part Number: C273526; ComponentLink1Description: LCSC; ComponentLink1URL: https://www.lcsc.com/product-detail/Tactile-Switches_E-Switch-TL3301NF160QG_C273526.html
footprint TL3301NF160QG
pins: 1, 2, 3, 4

## TL3340AF160QG
designator SW?
SWITCH TACTILE SPST-NO 0.05A 12V; Manufacturer: E-Switch; Manufacturer Part Number: TL3340AF160QG; Mechanical Life: 100000Cycles; Actuator Material: Polyphthalamide; Contact Current Rating: 50mA; Number of Positions: 2NUMBER; Operating Force: 160gf; Throw Configuration: SPST; Contact Resistance: 500mR; Illumination Type: Non-Illuminated,Illuminated; Switch Travel: 0.2mm; Switch Function: Off-Mom; Actuator Type: Standard; Actuator Length: 0.85mm; Item Type: Tactile Switch; Supplier: Digikey; Supplier Part Number: EG4627CT-ND; RoHS: Yes; Category: Tactile Switches; Stock: 110635; Pricing: 1=0.54, 10=0.521, 25=0.5016, 100=0.434, 250=0.39548, 500=0.36652, 1000=0.32795 (USD); Mounting Technology: Surface Mount; Case/Package: SMD/SMT; Contact Material: Stainless Steel,Silver; Contact Plating: Stainless Steel,Silver; Color: White; Housing Material: Polyphthalamide; Min Operating Temperature: -35°C; Max Operating Temperature: 85°C; Voltage Rating (DC): 12V; Package Quantity: 1; Packaging: Tape and Reel; Current Rating: 50mA; Max Voltage Rating (DC): 12V; Termination: Gull Wing; Electrical Life: 100000Cycles; Orientation: Right Angle; Series: TL3340; Height: 3.55mm; Size: 3.3mm; Reach SVHC Compliant: No; Lead Free: 5697LeadFree; RoHS Compliant: Yes; ComponentLink1URL: https://datasheet.ciiva.com/7637/tl3340-7637667.pdf?src-supplier=Element14; ComponentLink1Description: https://datasheet.ciiva.com/7637/tl3340-7637667.pdf?src-supplier=Element14; ComponentLink2URL: https://datasheet.ciiva.com/5284/tl3340-28153-5284108.pdf?src-supplier=Mouser; ComponentLink2Description: https://datasheet.ciiva.com/5284/tl3340-28153-5284108.pdf?src-supplier=Mouser; ComponentLink3URL: https://datasheet.ciiva.com/2900/p021301b-2900825.pdf?src-supplier=Digikey; ComponentLink3Description: https://datasheet.ciiva.com/2900/p021301b-2900825.pdf?src-supplier=Digikey; ComponentLink4URL: https://datasheet.ciiva.com/2900/p021301b-2900826.pdf?src-supplier=Digikey; ComponentLink4Description: https://datasheet.ciiva.com/2900/p021301b-2900826.pdf?src-supplier=Digikey; ComponentLink5URL: https://datasheet.ciiva.com/2900/p021301b-2900827.pdf?src-supplier=Digikey; ComponentLink5Description: https://datasheet.ciiva.com/2900/p021301b-2900827.pdf?src-supplier=Digikey; LCSC Part Number: C2886925
footprint TL3340AF160QG
pins: 1, 2, 3, S1, S2

## TL6340AF160Q
designator SW?
SWITCH TACT SPST-NO 20MA 12V; Manufacturer: E-Switch; Manufacturer Part Number: TL6340AF160Q; Supplier: Digi-Key; Supplier Part Number: 141-TL6340AF160QCT-ND; RoHS: Yes; Category: Tactile Switches; Stock: 2308; Pricing: 1=0.51, 10=0.496, 25=0.478, 100=0.4136, 250=0.37684, 500=0.34926, 1000=0.31249 (USD); LCSC Part Number: C4944967; Item Type: Switch
footprint TL6340AF160Q
pins: 1, 2, SH1, SH2

## TP12422673
designator SW?
50mA 100MΩ 100000 Times 260gf@±50gf 12V Surface Mount SPST SMD Tactile Switches ROHS; Manufacturer: ROCPU Switch; Manufacturer Part Number: TP12422673; Package: SMD; LCSC Part Number: C5381384; Item Type: Tactile Switch; ComponentLink1Description: LCSC; ComponentLink1URL: https://www.lcsc.com/product-detail/Tactile-Switches_ROCPU-Switches-TP12422673_C5381384.html
footprint TP12422673
pins: 1, 2

## TS24CA
designator SW?
1.8mm 3.5mm Rectangle button 50mA Surface Mount，Right Angle 4.55mm SPST 12V SMD Tactile Switches ROHS; Manufacturer: SHOU HAN; Manufacturer Part Number: TS24CA; Package: SMD; LCSC Part Number: C393942; Item Type: Tactile Switch; ComponentLink1Description: LCSC; ComponentLink1URL: https://www.lcsc.com/product-detail/Tactile-Switches_SHOU-HAN-TS24CA_C393942.html
footprint TS24CA
pins: 1, 2, 3, 4

## TS-1002-13026
designator SW?
50mA Straight SPST 12V Plugin,6x6mm Tactile Switches ROHS; Manufacturer: XUNPU; Manufacturer Part Number: TS-1002-13026; Package: Plugin,6x6mm; LCSC Part Number: C455107; Item Type: Tactile Switch; ComponentLink1Description: LCSC; ComponentLink1URL: https://www.lcsc.com/product-detail/span-style-background-color-ff0-Tactile-span-Switches_XUNPU-TS-1002-13026_C455107.html
footprint TS-1002-13026
pins: 1, 2, 3, 4

## TS-1002S-12026C
designator SW?
6mm 12mm Round Button 50mA Standing paste 6mm SPST 12V SMD,6x6mm Tactile Switches ROHS; Manufacturer: XUNPU; Manufacturer Part Number: TS-1002S-12026C; Package: SMD,6x6mm; LCSC Part Number: C455124; Item Type: Tactile Switch; ComponentLink1Description: LCSC; ComponentLink1URL: https://www.lcsc.com/product-detail/Tactile-Switches_XUNPU-TS-1002S-12026C_C455124.html?s_z=n_TS-1002S-12026C
footprint TS-1002S-12026C
pins: 1, 2, 3, 4

## TS-1087E-B3D2
designator SW?
Plugin-4P,7.7x3.5mm Tactile Switches ROHS; Manufacturer: Yuandi; Manufacturer Part Number: TS-1087E-B3D2; LCSC Part Number: C541963; Item Type: Tactile Switch
footprint TS-1087E-B3D2
pins: 1, 2, SH1, SH2

## TS-1088-AR02016
designator SW?
Without bracket 50mA 4mm 100000 Times 12V 160gf 3mm 2mm Round Button Standing paste SPST SMD Tactile Switches ROHS; Manufacturer: XUNPU; Manufacturer Part Number: TS-1088-AR02016; Package: SMD; LCSC Part Number: C720477; Item Type: Tactile Switch; ComponentLink1Description: LCSC; ComponentLink1URL: https://www.lcsc.com/product-detail/Tactile-Switches_XUNPU-TS-1088-AR02016_C720477.html?s_z=n_TS-1088-AR02016
footprint TS-1088-AR02016
pins: 1, 2

## TS-1091B-A8B3-D2
designator SW?
NO Lying SPST 250gf@±30gf Plugin Tactile Switches ROHS; Manufacturer: Yuandi; Manufacturer Part Number: TS-1091B-A8B3-D2; Package: Plugin; LCSC Part Number: C557914; Item Type: Tactile Switch; ComponentLink1Description: LCSC; ComponentLink1URL: https://www.lcsc.com/product-detail/Tactile-Switches_Yuandi-TS-1091B-A8B3-D2_C557914.html
footprint TS-1091B-A8B3-D2
pins: 1, 2, 3

## TS-1102SD-A-U-R
designator SW?
6mm 14mm 6mm 100gf SMD Tactile Switches ROHS; Manufacturer: XKB Connection; Manufacturer Part Number: TS-1102SD-A-U-R; Package: SMD; LCSC Part Number: C4748896; Item Type: Tactile Switch; ComponentLink1Description: LCSC; ComponentLink1URL: https://www.lcsc.com/product-detail/Tactile-Switches_XKB-Connection-TS-1102SD-A-U-R_C4748896.html
footprint TS-1102SD-A-U-R
pins: 1, 2, 3, 4

## TS-1103S-C-A
designator SW?
None Without 50mA 12mm 200,000 Times 260gf 12V 12mm 4.3mm Round Button Standing paste SPST SMD Tactile Switches ROHS; Manufacturer: XKB Connection; Manufacturer Part Number: TS-1103S-C-A; Package: SMD; LCSC Part Number: C318917; Item Type: Tactile Switch; ComponentLink1Description: LCSC; ComponentLink1URL: https://www.lcsc.com/product-detail/Tactile-Switches_XKB-Connection-TS-1103S-C-A_C318917.html
footprint TS-1103S-C-A
pins: 1, 2, 3, 4

## TS-1109S-B-B
designator SW?
No NO 50mA 100000 Times 160gf 12V Brick nogging SPST SMD Tactile Switches ROHS; Manufacturer: XKB Connectivity; Manufacturer Part Number: TS-1109S-B-B; Package: SMD; LCSC Part Number: C480315; Item Type: Tactile Switch; ComponentLink1Description: LCSC; ComponentLink1URL: https://www.lcsc.com/product-detail/Tactile-Switches_XKB-Connectivity-TS-1109S-B-B_C480315.html
footprint TS-1109S-B-B
pins: 1, 2, 3, 4

## TS-1109S-B-J
designator SW?
No NO 50mA 4.5mm 100000 160gf 12V -30℃~+85℃ 4.5mm 8mm Black Round Button Brick nogging SPST SMD Tactile Switches ROHS; Manufacturer: XKB Connectivity; Manufacturer Part Number: TS-1109S-B-J; Item Type: Switch; Package: SMD; LCSC Part Number: C480323; ComponentLink1Description: LCSC; ComponentLink1URL: https://www.lcsc.com/product-detail/span-style-background-color-ff0-Tactile-span-Switches_XKB-Connectivity-TS-1109S-B-J_C480323.html
footprint TS-1109S-B-J_
pins: 1, 2, 3, 4

## TS-1109S-C-B
designator SW?
No NO 50mA 4.5mm 100000 260gf 12V -30℃~+85℃ 4.5mm 4.3mm Black Round Button Brick nogging SPST SMD Tactile Switches ROHS; Manufacturer: XKB Connectivity; Manufacturer Part Number: TS-1109S-C-B; Item Type: Switch; Package: Custom; LCSC Part Number: C381037; ComponentLink1Description: LCSC; ComponentLink1URL: https://www.lcsc.com/product-detail/Tactile-Switches_XKB-Connectivity-TS-1109S-C-B_C381037.html
footprint TS-1109S-C-B
pins: 1, 2, 3, 4

## TS-1185EC-C-D-B
designator SW?
3mm 2mm Round Button 50mA Top3.65mm SPST 12V SMD Tactile Switches; Manufacturer: XKB; Manufacturer Part Number: TS-1185EC-C-D-B; Footprint: Custom; ComponentLink1Description: LCSC; ComponentLink1URL: https://lcsc.com/product-detail/Tactile-Switches_XKB-Connectivity-TS-1185EC-C-D-B_C318893.html; LCSC Part Number: C318893
footprint TS-1185EC-C-D-B_
pins: 1, 2

## TS-1187A-B-A-B
designator SW?
None Without bracket 50mA 5.1mm 100000 Times 160gf 12V 5.1mm 1.5mm Round Button Standing paste SPST SMD Tactile Switches ROHS; Manufacturer: XKB; Manufacturer Part Number: TS-1187A-B-A-B; Item Type: Switch; Footprint: Custom; LCSC Part Number: C318884; ComponentLink1Description: LCSC; ComponentLink1URL: https://www.lcsc.com/product-detail/Tactile-Switches_XKB-Connection-TS-1187A-B-A-B_C318884.html?s_z=n_C318884
footprint TS-1187A-B-A-B
pins: 1, 2, 3, 4

## TSA016A2518A
designator SW?
3.35mm 2.5mm Oval button 50mA Brick nogging 4.2mm 180gf 12V SMD Tactile Switches ROHS; Manufacturer: BZCN; Manufacturer Part Number: TSA016A2518A; Package: SMD; LCSC Part Number: C2888427; Item Type: Tactile Switch; ComponentLink1Description: LCSC; ComponentLink1URL: https://jlcpcb.com/partdetail/Bzcn-TSA016A2518A/C2888427
footprint TSA016A2518A
pins: 1, 2, 3, 4

## TSC016A03526A
designator SW?
4.5mm 3.5mm 50mA Round Button Straight 4.5mm 260gf 12V Plugin Tactile Switches ROHS; Manufacturer: BZCN; Manufacturer Part Number: TSC016A03526A; Package: Plugin; LCSC Part Number: C2888490; Item Type: Tactile Switch; ComponentLink1Description: LCSC; ComponentLink1URL: https://jlcpcb.com/partdetail/Bzcn-TSC016A03526A/C2888490
footprint TSC016A03526A
pins: 1, 2, 3, 4

## TSC016A07018A
designator SW?
4.5mm 7mm 50mA Round Button Straight 4.5mm 180gf 12V Plugin Tactile Switches ROHS; Manufacturer: BZCN; Manufacturer Part Number: TSC016A07018A; Item Type: Connector; LCSC Part Number: C2888497; Package: Plugin
footprint TSC016A07018A
pins: 1, 2, 3, 4

## YTS-B003-2A
designator SW?
3.5mm 3.5mm SMDSplicing Black Rectangle button 50mA Surface Mount 7mm SPST 100MΩ 20000 12V 250gf@±50gf SMD Tactile Switches ROHS; Manufacturer: YIYUAN; Manufacturer Part Number: YTS-B003-2A; Package: Custom; LCSC Part Number: C2910695; ComponentLink1Description: LCSC; ComponentLink1URL: https://lcsc.com/product-detail/Tactile-Switches_YIYUAN-YTS-B003-2A_C2910695.html; Item Type: Tactile Switch
footprint YTS-B003-2A
pins: 1 COMMON, 2 NO, 3, 4, 5, 6